# Altium schematic symbol library I_1uH5.SchLib: 1 symbol
Pins are listed as number, name and electrical type; pins without a type are passive.

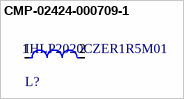
[diagram p0: symbol CMP-02424-000709-1]

## CMP-02424-000709-1
designator L?, comment IHLP2020CZER1R5M01
Fixed Inductors Commercial High Saturation Series 1.5uH 7.2A 20.7mΩ 20%; Max DC Current: 11A; DC Resistance (DCR): 20.7mR; Core Material: Metal; Shielding: Shielded; Test Frequency: 100kHz; Self Resonant Frequency: 5MHz; Length: 5.49mm; Package Quantity: 2000; Height - Seated (Max): 0.118inch; Inductance Tolerance: 20%; Lead Free: Lead Free; Current Rating: 7.2A; Max Operating Temperature: 125°C; Series: IHLP-2020CZ-01; Termination: SMD/SMT; RoHS Compliant: Yes; Width: 5.18mm; Military Standard: Not; Inductance: 1.5uH; Radiation Hardening: No; Case/Package: 2020; Saturation Current: 11A; Packaging: Tape and Reel; RMS Current (Irms): 7.2A; Tolerance: 20%; Depth: 5.43mm; Min Operating Temperature: -55°C; Mount: Surface Mount; Height: 3mm
footprint FP-IHLP-2020CZ-FP_1_905x2-MFG
pins: 1, 2